# Altium footprint library Altium_Box_Header_MPC3.PcbLib: 235 footprints (part 12 of 15)
Each footprint in its own frame and in the unit in brackets; x right, y up, seen from the top. Pads: shape width x height; smd on the part's side, far side on the other; paste and mask are expansions set on the pad; w line width, h text height; cw(c..) or ccw(c..) is an arc to the next point about the centre after c.
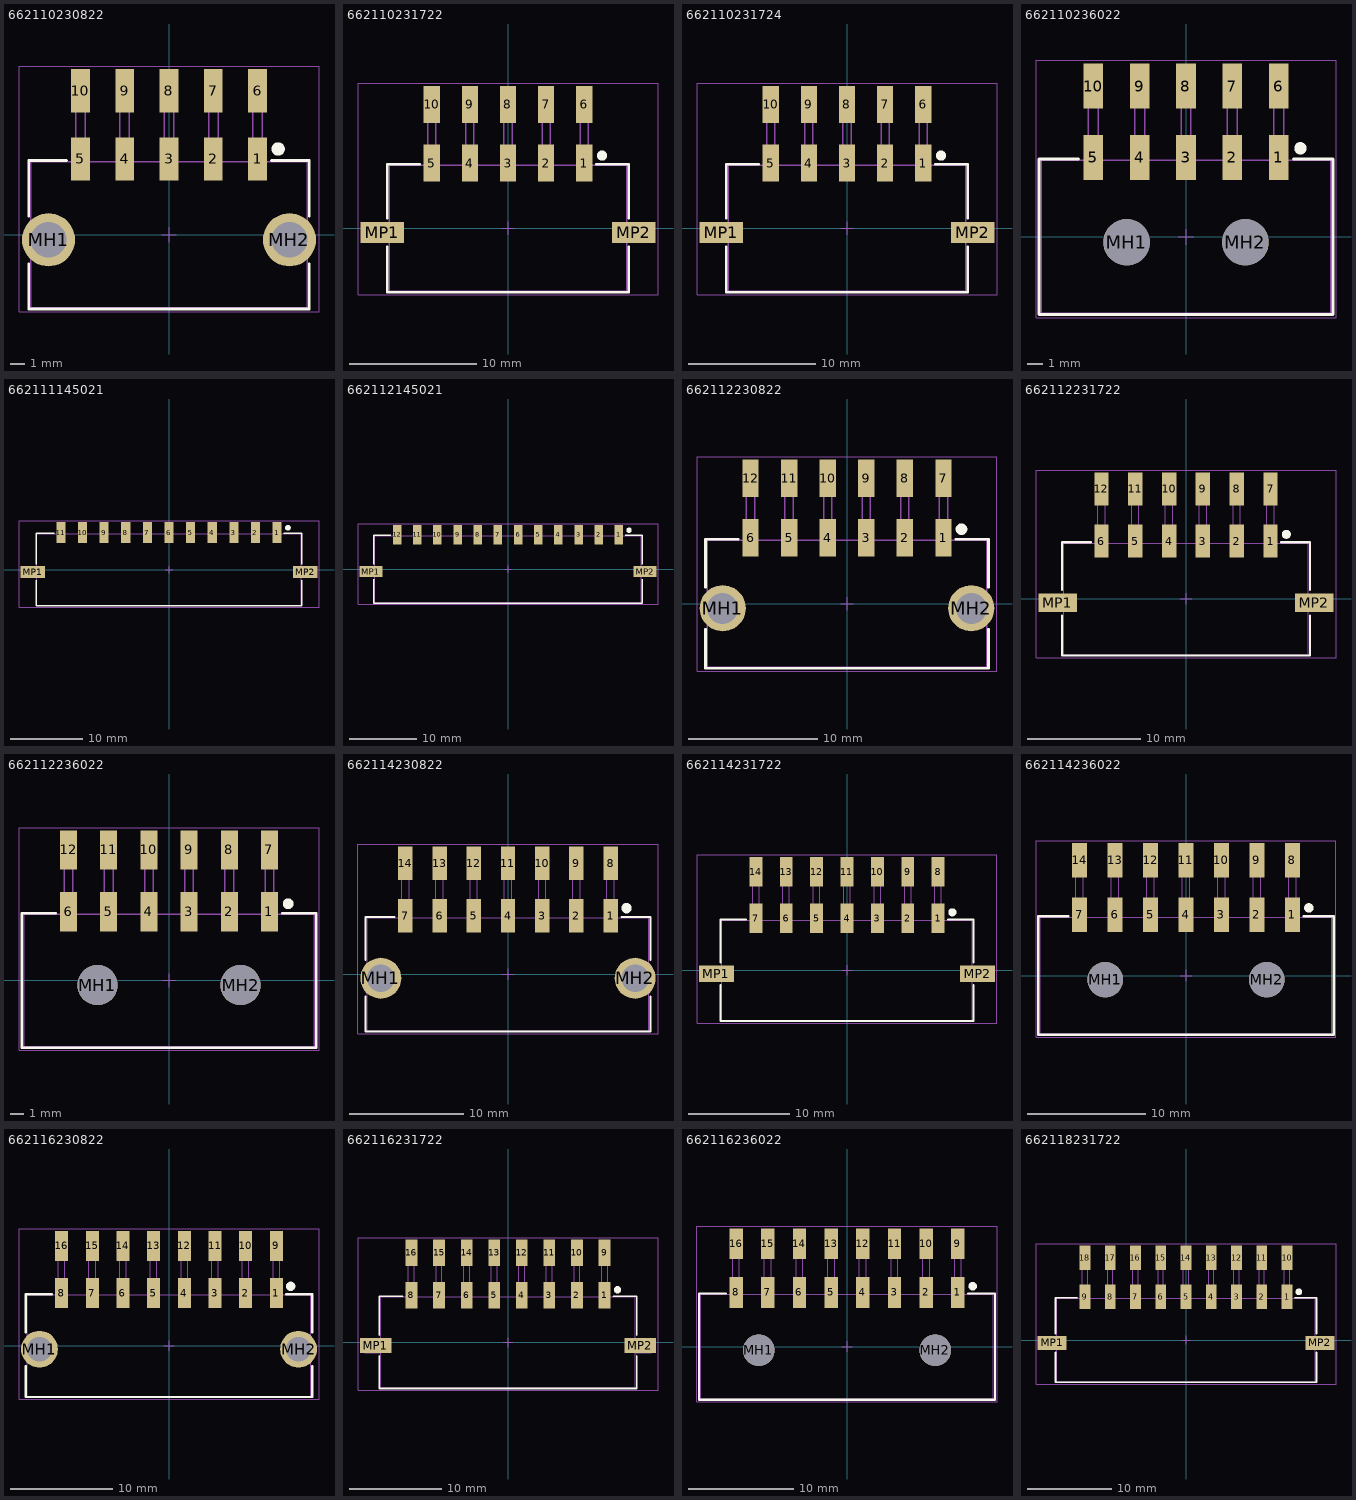
[diagram p11: the footprints below, top view; thin cyan lines are the x and y axes]

## 662110230822 [mm] "3.00mm SMT Male Dual Row Angled Header with THT Retention Clip, 10p"
height 8.26
pads (12):
  rect 1.27x2.92 smd: 1(6,5.13) 2(3,5.13) 3(0,5.13) 4(-3,5.13) 5(-6,5.13) 6(6,9.75) 7(3,9.75) 8(0,9.75) 9(-3,9.75) 10(-6,9.75)
  round 3.6 hole 2.41: MH1(-8.16,-0.35) MH2(8.16,-0.35)
Top Overlay:
  circle w0.5: c7.4,5.8 r0.2
  lines w0.2: -9.5,-1.975 -9.5,-5.025 9.5,-5.025 9.5,-1.975 ; -9.5,1.275 -9.5,5.025 -6.95,5.025 ; 6.95,5.025 9.5,5.025 9.5,1.275
Top Designator:
  text ".Designator" at -7.498,-0.5 h1.5
Top Component Outline:
  lines w0.1: -6.32,4.95 -6.32,10.95 -5.68,10.95 -5.68,4.95 ; -6.32,6.3 -5.68,6.3 ; -3.32,4.95 -3.32,10.95 -2.68,10.95 -2.68,4.95 ; -3.32,6.3 -2.68,6.3 ; -0.32,4.95 -0.32,10.95 0.32,10.95 0.32,4.95 ; -0.32,6.3 0.32,6.3 ; 2.679,4.95 2.679,10.95 3.319,10.95 3.319,4.95 ; 2.679,6.3 3.319,6.3 ; 5.679,4.95 5.679,10.95 6.319,10.95 6.319,4.95 ; 5.679,6.3 6.319,6.3 ; -9.35,-4.95 9.35,-4.95 9.35,4.95 -9.35,4.95 -9.35,-4.95
Top 3D Body:
  lines w0.1: -6.32,4.95 -6.32,10.95 -5.68,10.95 -5.68,4.95 ; -6.32,6.3 -5.68,6.3 ; -3.32,4.95 -3.32,10.95 -2.68,10.95 -2.68,4.95 ; -3.32,6.3 -2.68,6.3 ; -0.32,4.95 -0.32,10.95 0.32,10.95 0.32,4.95 ; -0.32,6.3 0.32,6.3 ; 2.679,4.95 2.679,10.95 3.319,10.95 3.319,4.95 ; 2.679,6.3 3.319,6.3 ; 5.679,4.95 5.679,10.95 6.319,10.95 6.319,4.95 ; 5.679,6.3 6.319,6.3 ; -9.35,-4.95 9.35,-4.95 9.35,4.95 -9.35,4.95 -9.35,-4.95
Top Courtyard:
  lines w0.05: -10.16,-5.225 -10.16,11.41 10.16,11.41 10.16,-5.225 -10.16,-5.225
Top Component Center:
  lines w0.05: -0.5,0 0.5,0 ; 0,-0.5 0,0.5
3D body "662110230822.stp": height 8.79, standoff -3.07, extent -9.35,-4.95 9.35,10.95

## 662110231722 [mm] "3.00mm SMT Male Dual Row Angled Header with SMT Solder Tab (Reel), 10p"
height 8.26
pads (12):
  rect 1.27x2.92 smd: 1(6,5.13) 2(3,5.13) 3(0,5.13) 4(-3,5.13) 5(-6,5.13) 6(6,9.75) 7(3,9.75) 8(0,9.75) 9(-3,9.75) 10(-6,9.75)
  rect 3.43x1.65 smd: MP1(-9.895,-0.35) MP2(9.895,-0.35)
Top Overlay:
  circle w0.4: c7.4,5.725 r0.2
  lines w0.2: -9.5,-1.475 -9.5,-5.025 9.5,-5.025 9.5,-1.475 ; -9.5,0.775 -9.5,5.025 -6.95,5.025 ; 6.95,5.025 9.5,5.025 9.5,0.775
Top Designator:
  text ".Designator" at -7.498,-0.5 h1.5
Top Component Outline:
  lines w0.1: -9.35,-1.1 -11.05,-1.1 -11.05,0.4 -9.35,0.4 ; -6.32,4.95 -6.32,10.95 -5.68,10.95 -5.68,4.95 ; -6.32,6.3 -5.68,6.3 ; -3.32,4.95 -3.32,10.95 -2.68,10.95 -2.68,4.95 ; -3.32,6.3 -2.68,6.3 ; -0.32,4.95 -0.32,10.95 0.32,10.95 0.32,4.95 ; -0.32,6.3 0.32,6.3 ; 2.68,4.95 2.68,10.95 3.32,10.95 3.32,4.95 ; 2.68,6.3 3.32,6.3 ; 5.68,4.95 5.68,10.95 6.32,10.95 6.32,4.95 ; 5.68,6.3 6.32,6.3 ; 9.35,-1.1 11.05,-1.1 11.05,0.4 9.35,0.4 ; -9.35,-4.95 9.35,-4.95 9.35,4.95 -9.35,4.95 -9.35,-4.95
Top 3D Body:
  lines w0.1: -9.35,-1.1 -11.05,-1.1 -11.05,0.4 -9.35,0.4 ; -6.32,4.95 -6.32,10.95 -5.68,10.95 -5.68,4.95 ; -6.32,6.3 -5.68,6.3 ; -3.32,4.95 -3.32,10.95 -2.68,10.95 -2.68,4.95 ; -3.32,6.3 -2.68,6.3 ; -0.32,4.95 -0.32,10.95 0.32,10.95 0.32,4.95 ; -0.32,6.3 0.32,6.3 ; 2.68,4.95 2.68,10.95 3.32,10.95 3.32,4.95 ; 2.68,6.3 3.32,6.3 ; 5.68,4.95 5.68,10.95 6.32,10.95 6.32,4.95 ; 5.68,6.3 6.32,6.3 ; 9.35,-1.1 11.05,-1.1 11.05,0.4 9.35,0.4 ; -9.35,-4.95 9.35,-4.95 9.35,4.95 -9.35,4.95 -9.35,-4.95
Top Courtyard:
  lines w0.05: -11.81,-5.225 -11.81,11.41 11.81,11.41 11.81,-5.225 -11.81,-5.225
Top Component Center:
  lines w0.05: -0.5,0 0.5,0 ; 0,-0.5 0,0.5
3D body "662110231722.stp": height 8.78, standoff 0.02, extent -11.05,-4.95 11.05,10.95

## 662110231724 [mm] "3.00mm SMT Male Dual Row Angled Header with SMT Solder Tab (Reel), 10p"
height 8.26
pads (12):
  rect 1.27x2.92 smd: 1(6,5.13) 2(3,5.13) 3(0,5.13) 4(-3,5.13) 5(-6,5.13) 6(6,9.75) 7(3,9.75) 8(0,9.75) 9(-3,9.75) 10(-6,9.75)
  rect 3.43x1.65 smd: MP1(-9.895,-0.35) MP2(9.895,-0.35)
Top Overlay:
  circle w0.4: c7.4,5.725 r0.2
  lines w0.2: -9.5,-1.475 -9.5,-5.025 9.5,-5.025 9.5,-1.475 ; -9.5,0.775 -9.5,5.025 -6.95,5.025 ; 6.95,5.025 9.5,5.025 9.5,0.775
Top Designator:
  text ".Designator" at -7.498,-0.5 h1.5
Top Component Outline:
  lines w0.1: -9.35,-1.1 -11.05,-1.1 -11.05,0.4 -9.35,0.4 ; -6.32,4.95 -6.32,10.95 -5.68,10.95 -5.68,4.95 ; -6.32,6.3 -5.68,6.3 ; -3.32,4.95 -3.32,10.95 -2.68,10.95 -2.68,4.95 ; -3.32,6.3 -2.68,6.3 ; -0.32,4.95 -0.32,10.95 0.32,10.95 0.32,4.95 ; -0.32,6.3 0.32,6.3 ; 2.68,4.95 2.68,10.95 3.32,10.95 3.32,4.95 ; 2.68,6.3 3.32,6.3 ; 5.68,4.95 5.68,10.95 6.32,10.95 6.32,4.95 ; 5.68,6.3 6.32,6.3 ; 9.35,-1.1 11.05,-1.1 11.05,0.4 9.35,0.4 ; -9.35,-4.95 9.35,-4.95 9.35,4.95 -9.35,4.95 -9.35,-4.95
Top 3D Body:
  lines w0.1: -9.35,-1.1 -11.05,-1.1 -11.05,0.4 -9.35,0.4 ; -6.32,4.95 -6.32,10.95 -5.68,10.95 -5.68,4.95 ; -6.32,6.3 -5.68,6.3 ; -3.32,4.95 -3.32,10.95 -2.68,10.95 -2.68,4.95 ; -3.32,6.3 -2.68,6.3 ; -0.32,4.95 -0.32,10.95 0.32,10.95 0.32,4.95 ; -0.32,6.3 0.32,6.3 ; 2.68,4.95 2.68,10.95 3.32,10.95 3.32,4.95 ; 2.68,6.3 3.32,6.3 ; 5.68,4.95 5.68,10.95 6.32,10.95 6.32,4.95 ; 5.68,6.3 6.32,6.3 ; 9.35,-1.1 11.05,-1.1 11.05,0.4 9.35,0.4 ; -9.35,-4.95 9.35,-4.95 9.35,4.95 -9.35,4.95 -9.35,-4.95
Top Courtyard:
  lines w0.05: -11.81,-5.225 -11.81,11.41 11.81,11.41 11.81,-5.225 -11.81,-5.225
Top Component Center:
  lines w0.05: -0.5,0 0.5,0 ; 0,-0.5 0,0.5
3D body "662110231724.stp": height 8.76, standoff 0, extent -11.05,-4.95 11.05,10.95

## 662110236022 [mm] "3.00mm SMT Male Dual Row Angled Header with Plastic Pegs, 10p"
height 8.26
pads (12):
  rect 1.27x2.92 smd: 1(6,5.13) 2(3,5.13) 3(0,5.13) 4(-3,5.13) 5(-6,5.13) 6(6,9.75) 7(3,9.75) 8(0,9.75) 9(-3,9.75) 10(-6,9.75)
  round 3 hole 3 unplated: MH1(-3.84,-0.35) MH2(3.84,-0.35)
Top Overlay:
  circle w0.4: c7.4,5.725 r0.2
  lines w0.2: -6.95,5.025 -9.5,5.025 -9.5,-5.025 9.5,-5.025 9.5,5.025 6.95,5.025
Top Designator:
  text ".Designator" at -7.498,-0.5 h1.5
Top Component Outline:
  lines w0.1: -6.32,4.95 -6.32,10.95 -5.68,10.95 -5.68,4.95 ; -6.32,6.3 -5.68,6.3 ; -3.32,4.95 -3.32,10.95 -2.68,10.95 -2.68,4.95 ; -3.32,6.3 -2.68,6.3 ; -0.32,4.95 -0.32,10.95 0.32,10.95 0.32,4.95 ; -0.32,6.3 0.32,6.3 ; 2.68,4.95 2.68,10.95 3.32,10.95 3.32,4.95 ; 2.68,6.3 3.32,6.3 ; 5.68,4.95 5.68,10.95 6.32,10.95 6.32,4.95 ; 5.68,6.3 6.32,6.3 ; -9.35,-4.95 9.35,-4.95 9.35,4.95 -9.35,4.95 -9.35,-4.95
Top 3D Body:
  lines w0.1: -6.32,4.95 -6.32,10.95 -5.68,10.95 -5.68,4.95 ; -6.32,6.3 -5.68,6.3 ; -3.32,4.95 -3.32,10.95 -2.68,10.95 -2.68,4.95 ; -3.32,6.3 -2.68,6.3 ; -0.32,4.95 -0.32,10.95 0.32,10.95 0.32,4.95 ; -0.32,6.3 0.32,6.3 ; 2.68,4.95 2.68,10.95 3.32,10.95 3.32,4.95 ; 2.68,6.3 3.32,6.3 ; 5.68,4.95 5.68,10.95 6.32,10.95 6.32,4.95 ; 5.68,6.3 6.32,6.3 ; -9.35,-4.95 9.35,-4.95 9.35,4.95 -9.35,4.95 -9.35,-4.95
Top Courtyard:
  lines w0.05: -9.7,-5.225 -9.7,11.41 9.7,11.41 9.7,-5.225 -9.7,-5.225
Top Component Center:
  lines w0.05: -0.5,0 0.5,0 ; 0,-0.5 0,0.5
3D body "662110236022.stp": height 8.79, standoff -3.17, extent -9.35,-4.95 9.35,10.95

## 662111145021 [mm] "3.00mm Male Single Row Angled Header, 11p"
height 5.57
pads (13):
  rect 1.27x2.92 smd: 1(15,5.12) 2(12,5.12) 3(9,5.12) 4(6,5.12) 5(3,5.12) 6(0,5.12) 7(-3,5.12) 8(-6,5.12) 9(-9,5.12) 10(-12,5.12) 11(-15,5.12)
  rect 3.43x1.65 smd: MP1(-18.895,-0.35) MP2(18.895,-0.35)
Top Overlay:
  circle w0.4: c16.5,5.8 r0.2
  lines w0.2: -18.45,-1.475 -18.45,-5.025 18.45,-5.025 18.45,-1.475 ; -18.45,0.775 -18.45,5.025 -15.95,5.025 ; 15.95,5.025 18.45,5.025 18.45,0.775
Top Designator:
  text ".Designator" at -7.498,-0.5 h1.5
Top Component Outline:
  lines w0.1: -18.325,-1 -20.325,-1 -20.325,0.3 -18.325,0.3 ; -15.32,4.95 -15.32,6.4 -14.68,6.4 -14.68,4.95 ; -12.32,4.95 -12.32,6.4 -11.68,6.4 -11.68,4.95 ; -9.32,4.95 -9.32,6.4 -8.68,6.4 -8.68,4.95 ; -6.32,4.95 -6.32,6.4 -5.68,6.4 -5.68,4.95 ; -3.32,4.95 -3.32,6.4 -2.68,6.4 -2.68,4.95 ; -0.32,4.95 -0.32,6.4 0.32,6.4 0.32,4.95 ; 2.68,4.95 2.68,6.4 3.32,6.4 3.32,4.95 ; 5.68,4.95 5.68,6.4 6.32,6.4 6.32,4.95 ; 8.68,4.95 8.68,6.4 9.32,6.4 9.32,4.95 ; 11.68,4.95 11.68,6.4 12.32,6.4 12.32,4.95 ; 14.68,4.95 14.68,6.4 15.32,6.4 15.32,4.95 ; 18.325,-1 20.325,-1 20.325,0.3 18.325,0.3 ; -18.325,-4.95 18.325,-4.95 18.325,4.95 -18.325,4.95 -18.325,-4.95
Top 3D Body:
  lines w0.1: -18.325,-1 -20.325,-1 -20.325,0.3 -18.325,0.3 ; -15.32,4.95 -15.32,6.4 -14.68,6.4 -14.68,4.95 ; -12.32,4.95 -12.32,6.4 -11.68,6.4 -11.68,4.95 ; -9.32,4.95 -9.32,6.4 -8.68,6.4 -8.68,4.95 ; -6.32,4.95 -6.32,6.4 -5.68,6.4 -5.68,4.95 ; -3.32,4.95 -3.32,6.4 -2.68,6.4 -2.68,4.95 ; -0.32,4.95 -0.32,6.4 0.32,6.4 0.32,4.95 ; 2.68,4.95 2.68,6.4 3.32,6.4 3.32,4.95 ; 5.68,4.95 5.68,6.4 6.32,6.4 6.32,4.95 ; 8.68,4.95 8.68,6.4 9.32,6.4 9.32,4.95 ; 11.68,4.95 11.68,6.4 12.32,6.4 12.32,4.95 ; 14.68,4.95 14.68,6.4 15.32,6.4 15.32,4.95 ; 18.325,-1 20.325,-1 20.325,0.3 18.325,0.3 ; -18.325,-4.95 18.325,-4.95 18.325,4.95 -18.325,4.95 -18.325,-4.95
Top Courtyard:
  lines w0.05: -20.81,-5.225 20.81,-5.225 20.81,6.78 -20.81,6.78 -20.81,-5.225
Top Component Center:
  lines w0.05: -0.5,0 0.5,0 ; 0,-0.5 0,0.5
3D body "662111145021.stp": height 5.61, standoff -0.03, extent -20.323,-4.95 20.323,6.403

## 662112145021 [mm] "3.00mm Male Single Row Angled Header, 12p"
height 5.57
pads (14):
  rect 1.27x2.92 smd: 1(16.5,5.12) 2(13.5,5.12) 3(10.5,5.12) 4(7.5,5.12) 5(4.5,5.12) 6(1.5,5.12) 7(-1.5,5.12) 8(-4.5,5.12) 9(-7.5,5.12) 10(-10.5,5.12) 11(-13.5,5.12) 12(-16.5,5.12)
  rect 3.43x1.65 smd: MP1(-20.395,-0.35) MP2(20.395,-0.35)
Top Overlay:
  circle w0.4: c18,5.8 r0.2
  lines w0.2: -19.95,-1.475 -19.95,-5.025 19.95,-5.025 19.95,-1.475 ; -19.95,0.775 -19.95,5.025 -17.45,5.025 ; 17.45,5.025 19.95,5.025 19.95,0.775
Top Designator:
  text ".Designator" at -7.498,-0.5 h1.5
Top Component Outline:
  lines w0.1: -19.825,-1 -21.825,-1 -21.825,0.3 -19.825,0.3 ; -16.82,4.95 -16.82,6.4 -16.18,6.4 -16.18,4.95 ; -13.82,4.95 -13.82,6.4 -13.18,6.4 -13.18,4.95 ; -10.82,4.95 -10.82,6.4 -10.18,6.4 -10.18,4.95 ; -7.82,4.95 -7.82,6.4 -7.18,6.4 -7.18,4.95 ; -4.82,4.95 -4.82,6.4 -4.18,6.4 -4.18,4.95 ; -1.82,4.95 -1.82,6.4 -1.18,6.4 -1.18,4.95 ; 1.18,4.95 1.18,6.4 1.82,6.4 1.82,4.95 ; 4.18,4.95 4.18,6.4 4.82,6.4 4.82,4.95 ; 7.18,4.95 7.18,6.4 7.82,6.4 7.82,4.95 ; 10.18,4.95 10.18,6.4 10.82,6.4 10.82,4.95 ; 13.18,4.95 13.18,6.4 13.82,6.4 13.82,4.95 ; 16.18,4.95 16.18,6.4 16.82,6.4 16.82,4.95 ; 19.825,-1 21.825,-1 21.825,0.3 19.825,0.3 ; -19.825,-4.95 -19.825,4.95 19.825,4.95 19.825,-4.95 -19.825,-4.95
Top 3D Body:
  lines w0.1: -19.825,-1 -21.825,-1 -21.825,0.3 -19.825,0.3 ; -16.82,4.95 -16.82,6.4 -16.18,6.4 -16.18,4.95 ; -13.82,4.95 -13.82,6.4 -13.18,6.4 -13.18,4.95 ; -10.82,4.95 -10.82,6.4 -10.18,6.4 -10.18,4.95 ; -7.82,4.95 -7.82,6.4 -7.18,6.4 -7.18,4.95 ; -4.82,4.95 -4.82,6.4 -4.18,6.4 -4.18,4.95 ; -1.82,4.95 -1.82,6.4 -1.18,6.4 -1.18,4.95 ; 1.18,4.95 1.18,6.4 1.82,6.4 1.82,4.95 ; 4.18,4.95 4.18,6.4 4.82,6.4 4.82,4.95 ; 7.18,4.95 7.18,6.4 7.82,6.4 7.82,4.95 ; 10.18,4.95 10.18,6.4 10.82,6.4 10.82,4.95 ; 13.18,4.95 13.18,6.4 13.82,6.4 13.82,4.95 ; 16.18,4.95 16.18,6.4 16.82,6.4 16.82,4.95 ; 19.825,-1 21.825,-1 21.825,0.3 19.825,0.3 ; -19.825,-4.95 -19.825,4.95 19.825,4.95 19.825,-4.95 -19.825,-4.95
Top Courtyard:
  lines w0.05: -22.31,-5.225 -22.31,6.78 22.31,6.78 22.31,-5.225 -22.31,-5.225
Top Component Center:
  lines w0.05: -0.5,0 0.5,0 ; 0,-0.5 0,0.5
3D body "662112145021.stp": height 5.61, standoff -0.03, extent -21.823,-4.95 21.823,6.403

## 662112230822 [mm] "3.00mm SMT Male Dual Row Angled Header with THT Retention Clip, 12p"
height 8.26
pads (14):
  rect 1.27x2.92 smd: 1(7.5,5.13) 2(4.5,5.13) 3(1.5,5.13) 4(-1.5,5.13) 5(-4.5,5.13) 6(-7.5,5.13) 7(7.5,9.75) 8(4.5,9.75) 9(1.5,9.75) 10(-1.5,9.75) 11(-4.5,9.75) 12(-7.5,9.75)
  round 3.6 hole 2.41: MH1(-9.66,-0.35) MH2(9.66,-0.35)
Top Overlay:
  circle w0.5: c8.9,5.8 r0.2
  lines w0.2: -11,-1.975 -11,-5.025 11,-5.025 11,-1.975 ; -11,1.275 -11,5.025 -8.45,5.025 ; 8.45,5.025 11,5.025 11,1.275
Top Designator:
  text ".Designator" at -7.498,-0.5 h1.5
Top Component Outline:
  lines w0.1: -7.82,4.95 -7.82,10.95 -7.18,10.95 -7.18,4.95 ; -7.82,6.3 -7.18,6.3 ; -4.82,4.95 -4.82,10.95 -4.18,10.95 -4.18,4.95 ; -4.82,6.3 -4.18,6.3 ; -1.82,4.95 -1.82,10.95 -1.18,10.95 -1.18,4.95 ; -1.82,6.3 -1.18,6.3 ; 1.179,4.95 1.179,10.95 1.819,10.95 1.819,4.95 ; 1.179,6.3 1.819,6.3 ; 4.179,4.95 4.179,10.95 4.819,10.95 4.819,4.95 ; 4.179,6.3 4.819,6.3 ; 7.179,4.95 7.179,10.95 7.819,10.95 7.819,4.95 ; 7.179,6.3 7.819,6.3 ; -10.85,-4.95 10.85,-4.95 10.85,4.95 -10.85,4.95 -10.85,-4.95
Top 3D Body:
  lines w0.1: -7.82,4.95 -7.82,10.95 -7.18,10.95 -7.18,4.95 ; -7.82,6.3 -7.18,6.3 ; -4.82,4.95 -4.82,10.95 -4.18,10.95 -4.18,4.95 ; -4.82,6.3 -4.18,6.3 ; -1.82,4.95 -1.82,10.95 -1.18,10.95 -1.18,4.95 ; -1.82,6.3 -1.18,6.3 ; 1.179,4.95 1.179,10.95 1.819,10.95 1.819,4.95 ; 1.179,6.3 1.819,6.3 ; 4.179,4.95 4.179,10.95 4.819,10.95 4.819,4.95 ; 4.179,6.3 4.819,6.3 ; 7.179,4.95 7.179,10.95 7.819,10.95 7.819,4.95 ; 7.179,6.3 7.819,6.3 ; -10.85,-4.95 10.85,-4.95 10.85,4.95 -10.85,4.95 -10.85,-4.95
Top Courtyard:
  lines w0.05: -11.66,-5.225 -11.66,11.41 11.66,11.41 11.66,-5.225 -11.66,-5.225
Top Component Center:
  lines w0.05: -0.5,0 0.5,0 ; 0,-0.5 0,0.5
3D body "662112230822.stp": height 8.79, standoff -3.07, extent -10.85,-4.95 10.85,10.95

## 662112231722 [mm] "3.00mm SMT Male Dual Row Angled Header with SMT Solder Tab (Reel), 12p"
height 8.26
pads (14):
  rect 1.27x2.92 smd: 1(7.5,5.13) 2(4.5,5.13) 3(1.5,5.13) 4(-1.5,5.13) 5(-4.5,5.13) 6(-7.5,5.13) 7(7.5,9.75) 8(4.5,9.75) 9(1.5,9.75) 10(-1.5,9.75) 11(-4.5,9.75) 12(-7.5,9.75)
  rect 3.43x1.65 smd: MP1(-11.395,-0.35) MP2(11.395,-0.35)
Top Overlay:
  circle w0.4: c8.9,5.725 r0.2
  lines w0.2: -11,-1.475 -11,-5.025 11,-5.025 11,-1.475 ; -11,0.775 -11,5.025 -8.45,5.025 ; 8.45,5.025 11,5.025 11,0.775
Top Designator:
  text ".Designator" at -7.498,-0.5 h1.5
Top Component Outline:
  lines w0.1: -10.85,-1.1 -12.55,-1.1 -12.55,0.4 -10.85,0.4 ; -7.82,4.95 -7.82,10.95 -7.18,10.95 -7.18,4.95 ; -7.82,6.3 -7.18,6.3 ; -4.82,4.95 -4.82,10.95 -4.18,10.95 -4.18,4.95 ; -4.82,6.3 -4.18,6.3 ; -1.82,4.95 -1.82,10.95 -1.18,10.95 -1.18,4.95 ; -1.82,6.3 -1.18,6.3 ; 1.18,4.95 1.18,10.95 1.82,10.95 1.82,4.95 ; 1.18,6.3 1.82,6.3 ; 4.18,4.95 4.18,10.95 4.82,10.95 4.82,4.95 ; 4.18,6.3 4.82,6.3 ; 7.18,4.95 7.18,10.95 7.82,10.95 7.82,4.95 ; 7.18,6.3 7.82,6.3 ; 10.85,-1.1 12.55,-1.1 12.55,0.4 10.85,0.4 ; -10.85,-4.95 10.85,-4.95 10.85,4.95 -10.85,4.95 -10.85,-4.95
Top 3D Body:
  lines w0.1: -10.85,-1.1 -12.55,-1.1 -12.55,0.4 -10.85,0.4 ; -7.82,4.95 -7.82,10.95 -7.18,10.95 -7.18,4.95 ; -7.82,6.3 -7.18,6.3 ; -4.82,4.95 -4.82,10.95 -4.18,10.95 -4.18,4.95 ; -4.82,6.3 -4.18,6.3 ; -1.82,4.95 -1.82,10.95 -1.18,10.95 -1.18,4.95 ; -1.82,6.3 -1.18,6.3 ; 1.18,4.95 1.18,10.95 1.82,10.95 1.82,4.95 ; 1.18,6.3 1.82,6.3 ; 4.18,4.95 4.18,10.95 4.82,10.95 4.82,4.95 ; 4.18,6.3 4.82,6.3 ; 7.18,4.95 7.18,10.95 7.82,10.95 7.82,4.95 ; 7.18,6.3 7.82,6.3 ; 10.85,-1.1 12.55,-1.1 12.55,0.4 10.85,0.4 ; -10.85,-4.95 -10.85,4.95 10.85,4.95 10.85,-4.95 -10.85,-4.95
Top Courtyard:
  lines w0.05: -13.31,-5.225 13.31,-5.225 13.31,11.41 -13.31,11.41 -13.31,-5.225
Top Component Center:
  lines w0.05: -0.5,0 0.5,0 ; 0,-0.5 0,0.5
3D body "662112231722.stp": height 8.78, standoff 0.02, extent -12.55,-4.95 12.55,10.95

## 662112236022 [mm] "3.00mm SMT Male Dual Row Angled Header with Plastic Pegs, 12p"
height 8.26
pads (14):
  rect 1.27x2.92 smd: 1(7.5,5.13) 2(4.5,5.13) 3(1.5,5.13) 4(-1.5,5.13) 5(-4.5,5.13) 6(-7.5,5.13) 7(7.5,9.75) 8(4.5,9.75) 9(1.5,9.75) 10(-1.5,9.75) 11(-4.5,9.75) 12(-7.5,9.75)
  round 3 hole 3 unplated: MH1(-5.34,-0.35) MH2(5.34,-0.35)
Top Overlay:
  circle w0.4: c8.9,5.725 r0.2
  lines w0.2: -8.45,5.025 -11,5.025 -11,-5.025 11,-5.025 11,5.025 8.45,5.025
Top Designator:
  text ".Designator" at -7.498,-0.5 h1.5
Top Component Outline:
  lines w0.1: -7.82,4.95 -7.82,10.95 -7.18,10.95 -7.18,4.95 ; -7.82,6.3 -7.18,6.3 ; -4.82,4.95 -4.82,10.95 -4.18,10.95 -4.18,4.95 ; -4.82,6.3 -4.18,6.3 ; -1.82,4.95 -1.82,10.95 -1.18,10.95 -1.18,4.95 ; -1.82,6.3 -1.18,6.3 ; 1.18,4.95 1.18,10.95 1.82,10.95 1.82,4.95 ; 1.18,6.3 1.82,6.3 ; 4.18,4.95 4.18,10.95 4.82,10.95 4.82,4.95 ; 4.18,6.3 4.82,6.3 ; 7.18,4.95 7.18,10.95 7.82,10.95 7.82,4.95 ; 7.18,6.3 7.82,6.3 ; -10.85,-4.95 10.85,-4.95 10.85,4.95 -10.85,4.95 -10.85,-4.95
Top 3D Body:
  lines w0.1: -7.82,4.95 -7.82,10.95 -7.18,10.95 -7.18,4.95 ; -7.82,6.3 -7.18,6.3 ; -4.82,4.95 -4.82,10.95 -4.18,10.95 -4.18,4.95 ; -4.82,6.3 -4.18,6.3 ; -1.82,4.95 -1.82,10.95 -1.18,10.95 -1.18,4.95 ; -1.82,6.3 -1.18,6.3 ; 1.18,4.95 1.18,10.95 1.82,10.95 1.82,4.95 ; 1.18,6.3 1.82,6.3 ; 4.18,4.95 4.18,10.95 4.82,10.95 4.82,4.95 ; 4.18,6.3 4.82,6.3 ; 7.18,4.95 7.18,10.95 7.82,10.95 7.82,4.95 ; 7.18,6.3 7.82,6.3 ; -10.85,-4.95 -10.85,4.95 10.85,4.95 10.85,-4.95 -10.85,-4.95
Top Courtyard:
  lines w0.05: -11.2,-5.225 11.2,-5.225 11.2,11.41 -11.2,11.41 -11.2,-5.225
Top Component Center:
  lines w0.05: -0.5,0 0.5,0 ; 0,-0.5 0,0.5
3D body "662112236022.stp": height 8.79, standoff -3.17, extent -10.85,-4.95 10.85,10.95

## 662114230822 [mm] "3.00mm SMT Male Dual Row Angled Header with THT Retention Clip, 14p"
height 8.26
pads (16):
  rect 1.27x2.92 smd: 1(9,5.13) 2(6,5.13) 3(3,5.13) 4(0,5.13) 5(-3,5.13) 6(-6,5.13) 7(-9,5.13) 8(9,9.75) 9(6,9.75) 10(3,9.75) 11(0,9.75) 12(-3,9.75) 13(-6,9.75) 14(-9,9.75)
  round 3.6 hole 2.41: MH1(-11.16,-0.35) MH2(11.16,-0.35)
Top Overlay:
  circle w0.5: c10.4,5.8 r0.2
  lines w0.2: -12.5,-1.975 -12.5,-5.025 12.5,-5.025 12.5,-1.975 ; -12.5,1.275 -12.5,5.025 -9.95,5.025 ; 9.95,5.025 12.5,5.025 12.5,1.275
Top Designator:
  text ".Designator" at -7.498,-0.5 h1.5
Top Component Outline:
  lines w0.1: -9.32,4.95 -9.32,10.95 -8.68,10.95 -8.68,4.95 ; -9.32,6.3 -8.68,6.3 ; -6.32,4.95 -6.32,10.95 -5.68,10.95 -5.68,4.95 ; -6.32,6.3 -5.68,6.3 ; -3.32,4.95 -3.32,10.95 -2.68,10.95 -2.68,4.95 ; -3.32,6.3 -2.68,6.3 ; -0.321,4.95 -0.321,10.95 0.319,10.95 0.319,4.95 ; -0.321,6.3 0.319,6.3 ; 2.679,4.95 2.679,10.95 3.319,10.95 3.319,4.95 ; 2.679,6.3 3.319,6.3 ; 5.679,4.95 5.679,10.95 6.319,10.95 6.319,4.95 ; 5.679,6.3 6.319,6.3 ; 8.678,4.95 8.678,10.95 9.318,10.95 9.318,4.95 ; 8.678,6.3 9.318,6.3 ; -12.35,-4.95 12.35,-4.95 12.35,4.95 -12.35,4.95 -12.35,-4.95
Top 3D Body:
  lines w0.1: -9.32,4.95 -9.32,10.95 -8.68,10.95 -8.68,4.95 ; -9.32,6.3 -8.68,6.3 ; -6.32,4.95 -6.32,10.95 -5.68,10.95 -5.68,4.95 ; -6.32,6.3 -5.68,6.3 ; -3.32,4.95 -3.32,10.95 -2.68,10.95 -2.68,4.95 ; -3.32,6.3 -2.68,6.3 ; -0.321,4.95 -0.321,10.95 0.319,10.95 0.319,4.95 ; -0.321,6.3 0.319,6.3 ; 2.679,4.95 2.679,10.95 3.319,10.95 3.319,4.95 ; 2.679,6.3 3.319,6.3 ; 5.679,4.95 5.679,10.95 6.319,10.95 6.319,4.95 ; 5.679,6.3 6.319,6.3 ; 8.678,4.95 8.678,10.95 9.318,10.95 9.318,4.95 ; 8.678,6.3 9.318,6.3 ; -12.35,-4.95 -12.35,4.95 12.35,4.95 12.35,-4.95 -12.35,-4.95
Top Courtyard:
  lines w0.05: -13.16,-5.225 13.16,-5.225 13.16,11.41 -13.16,11.41 -13.16,-5.225
Top Component Center:
  lines w0.05: -0.5,0 0.5,0 ; 0,-0.5 0,0.5
3D body "662114230822.stp": height 8.79, standoff -3.07, extent -12.35,-4.95 12.35,10.95

## 662114231722 [mm] "3.00mm SMT Male Dual Row Angled Header with SMT Solder Tab (Reel), 14p"
height 8.26
pads (16):
  rect 1.27x2.92 smd: 1(9,5.13) 2(6,5.13) 3(3,5.13) 4(0,5.13) 5(-3,5.13) 6(-6,5.13) 7(-9,5.13) 8(9,9.75) 9(6,9.75) 10(3,9.75) 11(0,9.75) 12(-3,9.75) 13(-6,9.75) 14(-9,9.75)
  rect 3.43x1.65 smd: MP1(-12.895,-0.35) MP2(12.895,-0.35)
Top Overlay:
  circle w0.4: c10.4,5.725 r0.2
  lines w0.2: -12.5,-1.475 -12.5,-5.025 12.5,-5.025 12.5,-1.475 ; -12.5,0.775 -12.5,5.025 -9.95,5.025 ; 9.95,5.025 12.5,5.025 12.5,0.775
Top Designator:
  text ".Designator" at -7.498,-0.5 h1.5
Top Component Outline:
  lines w0.1: -12.35,-1.1 -14.05,-1.1 -14.05,0.4 -12.35,0.4 ; -9.32,4.95 -9.32,10.95 -8.68,10.95 -8.68,4.95 ; -9.32,6.3 -8.68,6.3 ; -6.32,4.95 -6.32,10.95 -5.68,10.95 -5.68,4.95 ; -6.32,6.3 -5.68,6.3 ; -3.32,4.95 -3.32,10.95 -2.68,10.95 -2.68,4.95 ; -3.32,6.3 -2.68,6.3 ; -0.32,4.95 -0.32,10.95 0.32,10.95 0.32,4.95 ; -0.32,6.3 0.32,6.3 ; 2.68,4.95 2.68,10.95 3.32,10.95 3.32,4.95 ; 2.68,6.3 3.32,6.3 ; 5.68,4.95 5.68,10.95 6.32,10.95 6.32,4.95 ; 5.68,6.3 6.32,6.3 ; 8.68,4.95 8.68,10.95 9.32,10.95 9.32,4.95 ; 8.68,6.3 9.32,6.3 ; 12.35,-1.1 14.05,-1.1 14.05,0.4 12.35,0.4 ; -12.35,-4.95 12.35,-4.95 12.35,4.95 -12.35,4.95 -12.35,-4.95
Top 3D Body:
  lines w0.1: -12.35,-1.1 -14.05,-1.1 -14.05,0.4 -12.35,0.4 ; -9.32,4.95 -9.32,10.95 -8.68,10.95 -8.68,4.95 ; -9.32,6.3 -8.68,6.3 ; -6.32,4.95 -6.32,10.95 -5.68,10.95 -5.68,4.95 ; -6.32,6.3 -5.68,6.3 ; -3.32,4.95 -3.32,10.95 -2.68,10.95 -2.68,4.95 ; -3.32,6.3 -2.68,6.3 ; -0.32,4.95 -0.32,10.95 0.32,10.95 0.32,4.95 ; -0.32,6.3 0.32,6.3 ; 2.68,4.95 2.68,10.95 3.32,10.95 3.32,4.95 ; 2.68,6.3 3.32,6.3 ; 5.68,4.95 5.68,10.95 6.32,10.95 6.32,4.95 ; 5.68,6.3 6.32,6.3 ; 8.68,4.95 8.68,10.95 9.32,10.95 9.32,4.95 ; 8.68,6.3 9.32,6.3 ; 12.35,-1.1 14.05,-1.1 14.05,0.4 12.35,0.4 ; -12.35,-4.95 12.35,-4.95 12.35,4.95 -12.35,4.95 -12.35,-4.95
Top Courtyard:
  lines w0.05: -14.81,-5.225 -14.81,11.41 14.81,11.41 14.81,-5.225 -14.81,-5.225
Top Component Center:
  lines w0.05: -0.5,0 0.5,0 ; 0,-0.5 0,0.5
3D body "662114231722.stp": height 8.78, standoff 0.02, extent -14.05,-4.95 14.05,10.95

## 662114236022 [mm] "3.00mm SMT Male Dual Row Angled Header with Plastic Pegs, 14p"
height 8.26
pads (16):
  rect 1.27x2.92 smd: 1(9,5.13) 2(6,5.13) 3(3,5.13) 4(0,5.13) 5(-3,5.13) 6(-6,5.13) 7(-9,5.13) 8(9,9.75) 9(6,9.75) 10(3,9.75) 11(0,9.75) 12(-3,9.75) 13(-6,9.75) 14(-9,9.75)
  round 3 hole 3 unplated: MH1(-6.84,-0.35) MH2(6.84,-0.35)
Top Overlay:
  circle w0.4: c10.4,5.725 r0.2
  lines w0.2: -9.95,5.025 -12.5,5.025 -12.5,-5.025 12.5,-5.025 12.5,5.025 9.95,5.025
Top Designator:
  text ".Designator" at -7.498,-0.5 h1.5
Top Component Outline:
  lines w0.1: -9.32,4.95 -9.32,10.95 -8.68,10.95 -8.68,4.95 ; -9.32,6.3 -8.68,6.3 ; -6.32,4.95 -6.32,10.95 -5.68,10.95 -5.68,4.95 ; -6.32,6.3 -5.68,6.3 ; -3.32,4.95 -3.32,10.95 -2.68,10.95 -2.68,4.95 ; -3.32,6.3 -2.68,6.3 ; -0.32,4.95 -0.32,10.95 0.32,10.95 0.32,4.95 ; -0.32,6.3 0.32,6.3 ; 2.68,4.95 2.68,10.95 3.32,10.95 3.32,4.95 ; 2.68,6.3 3.32,6.3 ; 5.68,4.95 5.68,10.95 6.32,10.95 6.32,4.95 ; 5.68,6.3 6.32,6.3 ; 8.68,4.95 8.68,10.95 9.32,10.95 9.32,4.95 ; 8.68,6.3 9.32,6.3 ; -12.35,-4.95 12.35,-4.95 12.35,4.95 -12.35,4.95 -12.35,-4.95
Top 3D Body:
  lines w0.1: -9.32,4.95 -9.32,10.95 -8.68,10.95 -8.68,4.95 ; -9.32,6.3 -8.68,6.3 ; -6.32,4.95 -6.32,10.95 -5.68,10.95 -5.68,4.95 ; -6.32,6.3 -5.68,6.3 ; -3.32,4.95 -3.32,10.95 -2.68,10.95 -2.68,4.95 ; -3.32,6.3 -2.68,6.3 ; -0.32,4.95 -0.32,10.95 0.32,10.95 0.32,4.95 ; -0.32,6.3 0.32,6.3 ; 2.68,4.95 2.68,10.95 3.32,10.95 3.32,4.95 ; 2.68,6.3 3.32,6.3 ; 5.68,4.95 5.68,10.95 6.32,10.95 6.32,4.95 ; 5.68,6.3 6.32,6.3 ; 8.68,4.95 8.68,10.95 9.32,10.95 9.32,4.95 ; 8.68,6.3 9.32,6.3 ; -12.35,-4.95 12.35,-4.95 12.35,4.95 -12.35,4.95 -12.35,-4.95
Top Courtyard:
  lines w0.05: -12.7,-5.225 -12.7,11.41 12.7,11.41 12.7,-5.225 -12.7,-5.225
Top Component Center:
  lines w0.05: -0.5,0 0.5,0 ; 0,-0.5 0,0.5
3D body "662114236022.stp": height 8.79, standoff -3.17, extent -12.35,-4.95 12.35,10.95

## 662116230822 [mm] "3.00mm SMT Male Dual Row Angled Header with THT Retention Clip, 16p"
height 8.26
pads (18):
  rect 1.27x2.92 smd: 1(10.5,5.13) 2(7.5,5.13) 3(4.5,5.13) 4(1.5,5.13) 5(-1.5,5.13) 6(-4.5,5.13) 7(-7.5,5.13) 8(-10.5,5.13) 9(10.5,9.75) 10(7.5,9.75) 11(4.5,9.75) 12(1.5,9.75) 13(-1.5,9.75) 14(-4.5,9.75) 15(-7.5,9.75) 16(-10.5,9.75)
  round 3.6 hole 2.41: MH1(-12.66,-0.35) MH2(12.66,-0.35)
Top Overlay:
  circle w0.5: c11.9,5.8 r0.2
  lines w0.2: -14,-1.975 -14,-5.025 14,-5.025 14,-1.975 ; -14,1.275 -14,5.025 -11.45,5.025 ; 11.45,5.025 14,5.025 14,1.275
Top Designator:
  text ".Designator" at -7.498,-0.5 h1.5
Top Component Outline:
  lines w0.1: -10.82,4.95 -10.82,10.95 -10.18,10.95 -10.18,4.95 ; -10.82,6.3 -10.18,6.3 ; -7.82,4.95 -7.82,10.95 -7.18,10.95 -7.18,4.95 ; -7.82,6.3 -7.18,6.3 ; -4.82,4.95 -4.82,10.95 -4.18,10.95 -4.18,4.95 ; -4.82,6.3 -4.18,6.3 ; -1.821,4.95 -1.821,10.95 -1.181,10.95 -1.181,4.95 ; -1.821,6.3 -1.181,6.3 ; 1.179,4.95 1.179,10.95 1.819,10.95 1.819,4.95 ; 1.179,6.3 1.819,6.3 ; 4.179,4.95 4.179,10.95 4.819,10.95 4.819,4.95 ; 4.179,6.3 4.819,6.3 ; 7.178,4.95 7.178,10.95 7.818,10.95 7.818,4.95 ; 7.178,6.3 7.818,6.3 ; 10.178,4.95 10.178,10.95 10.818,10.95 10.818,4.95 ; 10.178,6.3 10.818,6.3 ; -13.85,-4.95 -13.85,4.95 13.85,4.95 13.85,-4.95 -13.85,-4.95
Top 3D Body:
  lines w0.1: -10.82,4.95 -10.82,10.95 -10.18,10.95 -10.18,4.95 ; -10.82,6.3 -10.18,6.3 ; -7.82,4.95 -7.82,10.95 -7.18,10.95 -7.18,4.95 ; -7.82,6.3 -7.18,6.3 ; -4.82,4.95 -4.82,10.95 -4.18,10.95 -4.18,4.95 ; -4.82,6.3 -4.18,6.3 ; -1.821,4.95 -1.821,10.95 -1.181,10.95 -1.181,4.95 ; -1.821,6.3 -1.181,6.3 ; 1.179,4.95 1.179,10.95 1.819,10.95 1.819,4.95 ; 1.179,6.3 1.819,6.3 ; 4.179,4.95 4.179,10.95 4.819,10.95 4.819,4.95 ; 4.179,6.3 4.819,6.3 ; 7.178,4.95 7.178,10.95 7.818,10.95 7.818,4.95 ; 7.178,6.3 7.818,6.3 ; 10.178,4.95 10.178,10.95 10.818,10.95 10.818,4.95 ; 10.178,6.3 10.818,6.3 ; -13.85,-4.95 -13.85,4.95 13.85,4.95 13.85,-4.95 -13.85,-4.95
Top Courtyard:
  lines w0.05: -14.66,-5.225 14.66,-5.225 14.66,11.41 -14.66,11.41 -14.66,-5.225
Top Component Center:
  lines w0.05: -0.5,0 0.5,0 ; 0,-0.5 0,0.5
3D body "662116230822.stp": height 8.79, standoff -3.07, extent -13.85,-4.95 13.85,10.95

## 662116231722 [mm] "3.00mm SMT Male Dual Row Angled Header with SMT Solder Tab (Reel), 16p"
height 8.26
pads (18):
  rect 1.27x2.92 smd: 1(10.5,5.13) 2(7.5,5.13) 3(4.5,5.13) 4(1.5,5.13) 5(-1.5,5.13) 6(-4.5,5.13) 7(-7.5,5.13) 8(-10.5,5.13) 9(10.5,9.75) 10(7.5,9.75) 11(4.5,9.75) 12(1.5,9.75) 13(-1.5,9.75) 14(-4.5,9.75) 15(-7.5,9.75) 16(-10.5,9.75)
  rect 3.43x1.65 smd: MP1(-14.395,-0.35) MP2(14.395,-0.35)
Top Overlay:
  circle w0.4: c11.9,5.725 r0.2
  lines w0.2: -14,-1.475 -14,-5.025 14,-5.025 14,-1.475 ; -14,0.775 -14,5.025 -11.45,5.025 ; 11.45,5.025 14,5.025 14,0.775
Top Designator:
  text ".Designator" at -7.498,-0.5 h1.5
Top Component Outline:
  lines w0.1: -13.85,-1.1 -15.55,-1.1 -15.55,0.4 -13.85,0.4 ; -10.82,4.95 -10.82,10.95 -10.18,10.95 -10.18,4.95 ; -10.82,6.3 -10.18,6.3 ; -7.82,4.95 -7.82,10.95 -7.18,10.95 -7.18,4.95 ; -7.82,6.3 -7.18,6.3 ; -4.82,4.95 -4.82,10.95 -4.18,10.95 -4.18,4.95 ; -4.82,6.3 -4.18,6.3 ; -1.82,4.95 -1.82,10.95 -1.18,10.95 -1.18,4.95 ; -1.82,6.3 -1.18,6.3 ; 1.18,4.95 1.18,10.95 1.82,10.95 1.82,4.95 ; 1.18,6.3 1.82,6.3 ; 4.18,4.95 4.18,10.95 4.82,10.95 4.82,4.95 ; 4.18,6.3 4.82,6.3 ; 7.18,4.95 7.18,10.95 7.82,10.95 7.82,4.95 ; 7.18,6.3 7.82,6.3 ; 10.18,4.95 10.18,10.95 10.82,10.95 10.82,4.95 ; 10.18,6.3 10.82,6.3 ; 13.85,-1.1 15.55,-1.1 15.55,0.4 13.85,0.4 ; -13.85,-4.95 13.85,-4.95 13.85,4.95 -13.85,4.95 -13.85,-4.95
Top 3D Body:
  lines w0.1: -13.85,-1.1 -15.55,-1.1 -15.55,0.4 -13.85,0.4 ; -10.82,4.95 -10.82,10.95 -10.18,10.95 -10.18,4.95 ; -10.82,6.3 -10.18,6.3 ; -7.82,4.95 -7.82,10.95 -7.18,10.95 -7.18,4.95 ; -7.82,6.3 -7.18,6.3 ; -4.82,4.95 -4.82,10.95 -4.18,10.95 -4.18,4.95 ; -4.82,6.3 -4.18,6.3 ; -1.82,4.95 -1.82,10.95 -1.18,10.95 -1.18,4.95 ; -1.82,6.3 -1.18,6.3 ; 1.18,4.95 1.18,10.95 1.82,10.95 1.82,4.95 ; 1.18,6.3 1.82,6.3 ; 4.18,4.95 4.18,10.95 4.82,10.95 4.82,4.95 ; 4.18,6.3 4.82,6.3 ; 7.18,4.95 7.18,10.95 7.82,10.95 7.82,4.95 ; 7.18,6.3 7.82,6.3 ; 10.18,4.95 10.18,10.95 10.82,10.95 10.82,4.95 ; 10.18,6.3 10.82,6.3 ; 13.85,-1.1 15.55,-1.1 15.55,0.4 13.85,0.4 ; -13.85,-4.95 -13.85,4.95 13.85,4.95 13.85,-4.95 -13.85,-4.95
Top Courtyard:
  lines w0.05: -16.31,-5.225 16.31,-5.225 16.31,11.41 -16.31,11.41 -16.31,-5.225
Top Component Center:
  lines w0.05: -0.5,0 0.5,0 ; 0,-0.5 0,0.5
3D body "662116231722.stp": height 8.78, standoff 0.02, extent -15.55,-4.95 15.55,10.95

## 662116236022 [mm] "3.00mm SMT Male Dual Row Angled Header with Plastic Pegs, 16p"
height 8.26
pads (18):
  rect 1.27x2.92 smd: 1(10.5,5.13) 2(7.5,5.13) 3(4.5,5.13) 4(1.5,5.13) 5(-1.5,5.13) 6(-4.5,5.13) 7(-7.5,5.13) 8(-10.5,5.13) 9(10.5,9.75) 10(7.5,9.75) 11(4.5,9.75) 12(1.5,9.75) 13(-1.5,9.75) 14(-4.5,9.75) 15(-7.5,9.75) 16(-10.5,9.75)
  round 3 hole 3 unplated: MH1(-8.34,-0.35) MH2(8.34,-0.35)
Top Overlay:
  circle w0.4: c11.9,5.725 r0.2
  lines w0.2: -11.45,5.025 -14,5.025 -14,-5.025 14,-5.025 14,5.025 11.45,5.025
Top Designator:
  text ".Designator" at -7.498,-0.5 h1.5
Top Component Outline:
  lines w0.1: -10.82,4.95 -10.82,10.95 -10.18,10.95 -10.18,4.95 ; -10.82,6.3 -10.18,6.3 ; -7.82,4.95 -7.82,10.95 -7.18,10.95 -7.18,4.95 ; -7.82,6.3 -7.18,6.3 ; -4.82,4.95 -4.82,10.95 -4.18,10.95 -4.18,4.95 ; -4.82,6.3 -4.18,6.3 ; -1.82,4.95 -1.82,10.95 -1.18,10.95 -1.18,4.95 ; -1.82,6.3 -1.18,6.3 ; 1.18,4.95 1.18,10.95 1.82,10.95 1.82,4.95 ; 1.18,6.3 1.82,6.3 ; 4.18,4.95 4.18,10.95 4.82,10.95 4.82,4.95 ; 4.18,6.3 4.82,6.3 ; 7.18,4.95 7.18,10.95 7.82,10.95 7.82,4.95 ; 7.18,6.3 7.82,6.3 ; 10.18,4.95 10.18,10.95 10.82,10.95 10.82,4.95 ; 10.18,6.3 10.82,6.3 ; -13.85,-4.95 13.85,-4.95 13.85,4.95 -13.85,4.95 -13.85,-4.95
Top 3D Body:
  lines w0.1: -10.82,4.95 -10.82,10.95 -10.18,10.95 -10.18,4.95 ; -10.82,6.3 -10.18,6.3 ; -7.82,4.95 -7.82,10.95 -7.18,10.95 -7.18,4.95 ; -7.82,6.3 -7.18,6.3 ; -4.82,4.95 -4.82,10.95 -4.18,10.95 -4.18,4.95 ; -4.82,6.3 -4.18,6.3 ; -1.82,4.95 -1.82,10.95 -1.18,10.95 -1.18,4.95 ; -1.82,6.3 -1.18,6.3 ; 1.18,4.95 1.18,10.95 1.82,10.95 1.82,4.95 ; 1.18,6.3 1.82,6.3 ; 4.18,4.95 4.18,10.95 4.82,10.95 4.82,4.95 ; 4.18,6.3 4.82,6.3 ; 7.18,4.95 7.18,10.95 7.82,10.95 7.82,4.95 ; 7.18,6.3 7.82,6.3 ; 10.18,4.95 10.18,10.95 10.82,10.95 10.82,4.95 ; 10.18,6.3 10.82,6.3 ; -13.85,-4.95 13.85,-4.95 13.85,4.95 -13.85,4.95 -13.85,-4.95
Top Courtyard:
  lines w0.05: -14.2,-5.225 -14.2,11.41 14.2,11.41 14.2,-5.225 -14.2,-5.225
Top Component Center:
  lines w0.05: -0.5,0 0.5,0 ; 0,-0.5 0,0.5
3D body "662116236022.stp": height 8.79, standoff -3.17, extent -13.85,-4.95 13.85,10.95

## 662118231722 [mm] "3.00mm SMT Male Dual Row Angled Header with SMT Solder Tab (Reel), 18p"
height 8.26
pads (20):
  rect 1.27x2.92 smd: 1(12,5.13) 2(9,5.13) 3(6,5.13) 4(3,5.13) 5(0,5.13) 6(-3,5.13) 7(-6,5.13) 8(-9,5.13) 9(-12,5.13) 10(12,9.75) 11(9,9.75) 12(6,9.75) 13(3,9.75) 14(0,9.75) 15(-3,9.75) 16(-6,9.75) 17(-9,9.75) 18(-12,9.75)
  rect 3.43x1.65 smd: MP1(-15.895,-0.35) MP2(15.895,-0.35)
Top Overlay:
  circle w0.4: c13.4,5.725 r0.2
  lines w0.2: -15.5,-1.475 -15.5,-5.025 15.5,-5.025 15.5,-1.475 ; -15.5,0.775 -15.5,5.025 -12.95,5.025 ; 12.95,5.025 15.5,5.025 15.5,0.775
Top Designator:
  text ".Designator" at -7.498,-0.5 h1.5
Top Component Outline:
  lines w0.1: -15.35,-1.1 -17.05,-1.1 -17.05,0.4 -15.35,0.4 ; -12.32,4.95 -12.32,10.95 -11.68,10.95 -11.68,4.95 ; -12.32,6.3 -11.68,6.3 ; -9.32,4.95 -9.32,10.95 -8.68,10.95 -8.68,4.95 ; -9.32,6.3 -8.68,6.3 ; -6.32,4.95 -6.32,10.95 -5.68,10.95 -5.68,4.95 ; -6.32,6.3 -5.68,6.3 ; -3.32,4.95 -3.32,10.95 -2.68,10.95 -2.68,4.95 ; -3.32,6.3 -2.68,6.3 ; -0.32,4.95 -0.32,10.95 0.32,10.95 0.32,4.95 ; -0.32,6.3 0.32,6.3 ; 2.68,4.95 2.68,10.95 3.32,10.95 3.32,4.95 ; 2.68,6.3 3.32,6.3 ; 5.68,4.95 5.68,10.95 6.32,10.95 6.32,4.95 ; 5.68,6.3 6.32,6.3 ; 8.68,4.95 8.68,10.95 9.32,10.95 9.32,4.95 ; 8.68,6.3 9.32,6.3 ; 11.68,4.95 11.68,10.95 12.32,10.95 12.32,4.95 ; 11.68,6.3 12.32,6.3 ; 15.35,-1.1 17.05,-1.1 17.05,0.4 15.35,0.4 ; -15.35,-4.95 15.35,-4.95 15.35,4.95 -15.35,4.95 -15.35,-4.95
Top 3D Body:
  lines w0.1: -15.35,-1.1 -17.05,-1.1 -17.05,0.4 -15.35,0.4 ; -12.32,4.95 -12.32,10.95 -11.68,10.95 -11.68,4.95 ; -12.32,6.3 -11.68,6.3 ; -9.32,4.95 -9.32,10.95 -8.68,10.95 -8.68,4.95 ; -9.32,6.3 -8.68,6.3 ; -6.32,4.95 -6.32,10.95 -5.68,10.95 -5.68,4.95 ; -6.32,6.3 -5.68,6.3 ; -3.32,4.95 -3.32,10.95 -2.68,10.95 -2.68,4.95 ; -3.32,6.3 -2.68,6.3 ; -0.32,4.95 -0.32,10.95 0.32,10.95 0.32,4.95 ; -0.32,6.3 0.32,6.3 ; 2.68,4.95 2.68,10.95 3.32,10.95 3.32,4.95 ; 2.68,6.3 3.32,6.3 ; 5.68,4.95 5.68,10.95 6.32,10.95 6.32,4.95 ; 5.68,6.3 6.32,6.3 ; 8.68,4.95 8.68,10.95 9.32,10.95 9.32,4.95 ; 8.68,6.3 9.32,6.3 ; 11.68,4.95 11.68,10.95 12.32,10.95 12.32,4.95 ; 11.68,6.3 12.32,6.3 ; 15.35,-1.1 17.05,-1.1 17.05,0.4 15.35,0.4 ; -15.35,-4.95 15.35,-4.95 15.35,4.95 -15.35,4.95 -15.35,-4.95
Top Courtyard:
  lines w0.05: -17.81,-5.225 -17.81,11.41 17.81,11.41 17.81,-5.225 -17.81,-5.225
Top Component Center:
  lines w0.05: -0.5,0 0.5,0 ; 0,-0.5 0,0.5
3D body "662118231722.stp": height 8.78, standoff 0.02, extent -17.05,-4.95 17.05,10.95